# Altium footprint library huan_basic.PcbLib: 138 footprints (part 8 of 9)
Each footprint in its own frame and in the unit in brackets; x right, y up, seen from the top. Pads: shape width x height; smd on the part's side, far side on the other; paste and mask are expansions set on the pad; w line width, h text height; cw(c..) or ccw(c..) is an arc to the next point about the centre after c.
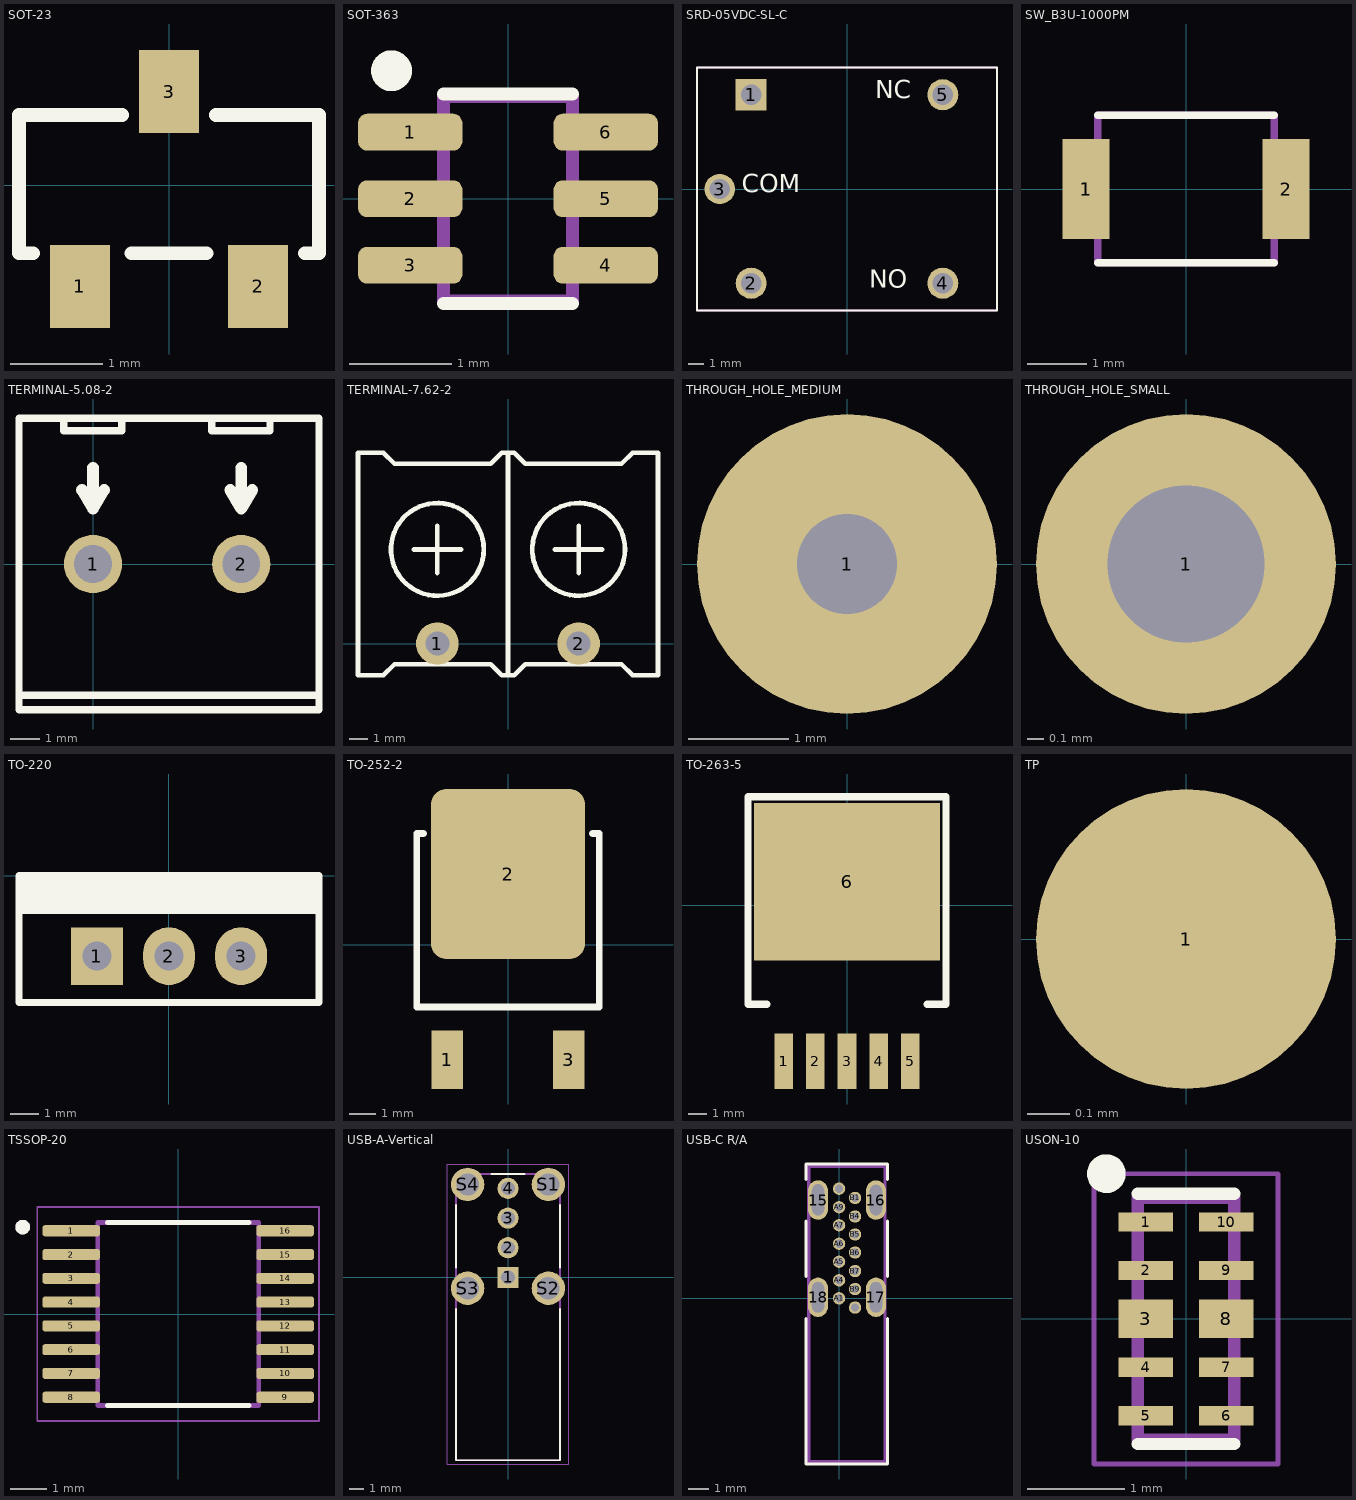
[diagram p7: the footprints below, top view; thin cyan lines are the x and y axes]

## SOT-23 [mm]
pads (3):
  rect 0.65x0.9 smd: 1(-0.965,-1.095) 2(0.965,-1.095) 3(0,1.016)
Top Overlay:
  lines w0.15: -1.473,-0.737 -1.626,-0.737 -1.626,0.762 -0.508,0.762 ; -0.406,-0.737 0.406,-0.737 ; 0.508,0.762 1.626,0.762 1.626,-0.737 1.473,-0.737
3D body "SOT23-3.step": height 1.1, standoff 0, extent -1.499,-1.25 1.499,1.25

## SOT-363 [mm]
pads (6):
  rrect50% 1.02x0.36 smd: 1(-0.955,0.65) 2(-0.955,0) 3(-0.955,-0.65) 4(0.955,-0.65) 5(0.955,0) 6(0.955,0.65)
Top Overlay:
  circle w0.2: c-1.138,1.25 r0.1
  lines w0.127: -0.63,-1.023 0.63,-1.023 ; -0.63,1.023 0.63,1.023
Mechanical 13:
  lines w0.127: -0.63,-1 -0.63,1 0.63,1 0.63,-1 -0.63,-1
3D body "step_temp.STEP": height 1.1, standoff 0, extent -1.05,-1 1.05,1

## SRD-05VDC-SL-C [mm]
pads (5):
  rect 1.98x1.98 hole 1.32: 1(-6.1,6)
  round 1.98 hole 1.32: 2(-6.1,-6) 4(6.1,-6) 5(6.1,6)
  round 1.935 hole 1.29: 3(-8.1,0)
Top Overlay:
  lines w0.127: -9.55,-7.75 9.55,-7.75 9.55,7.75 -9.55,7.75 -9.55,-7.75
  text "COM" at -6.712,-0.587 h2
  text "NO" at 1.416,-6.683 h2
  text "NC" at 1.797,5.382 h2
Mechanical 13:
  lines w0.127: -9.55,-7.75 9.55,-7.75 9.55,7.75 -9.55,7.75 -9.55,-7.75
3D body "RELAY_SRD-05VDC.STEP": height 15.9, standoff -2.8, extent -9.6,-7.8 9.6,7.8

## SW_B3U-1000PM [mm]
height 1.65
pads (3):
  rect 0.8x1.7 smd paste+0 mask+0.102: 1(-1.7,0) 1(-1.7,0) 2(1.7,0)
Top Overlay:
  lines w0.127: -1.5,-1.25 1.5,-1.25 ; -1.5,1.25 1.5,1.25
Mechanical 13:
  lines w0.127: -1.5,-1.25 -1.5,1.25 1.5,1.25 1.5,-1.25 -1.5,-1.25
3D body "step_temp.STEP": height 1.75, standoff 0, extent -2,-1.25 2,1.25

## TERMINAL-5.08-2 [mm]
pads (2):
  round 2 hole 1.3: 1(0,0) 2(5.08,0)
Top Overlay:
  lines w0.254: -2.54,-4.496 7.747,-4.496 ; -1.008,5 -1.008,4.572 0.986,4.572 0.986,5 ; 4.072,5 4.072,4.572 6.066,4.572 6.066,5 ; -2.54,-5 -2.54,5 7.747,5 7.747,-5 -2.54,-5
  lines w0.4: -0.381,2.54 0,1.905 ; 0,3.302 0,1.905 ; 0.381,2.54 0,1.905 ; 4.699,2.54 5.08,1.905 ; 5.08,3.302 5.08,1.905 ; 5.461,2.54 5.08,1.905
3D body "2er Terminal Block.step": height 14.1, standoff -4.15, extent -2.54,-5 8.02,5

## TERMINAL-7.62-2 [mm]
pads (2):
  round 2.3 hole 1.3: 1(-3.81,0) 2(3.81,0)
Top Overlay:
  circle w0.254: c3.81,5.08 r2.5
  circle w0.254: c-3.81,5.08 r2.5
  lines w0.254: -5.08,5.08 -2.54,5.08 ; -3.81,3.81 -3.81,6.35 ; 2.54,5.08 5.08,5.08 ; 3.81,3.81 3.81,6.35 ; 0,-1.714 0,10.3 ; 0,-1.714 0.343,-1.714 0.94,-1.117 6.121,-1.117 6.718,-1.714 8.09,-1.714 8.09,10.3 6.718,10.3 6.121,9.703 0.94,9.703 0.343,10.3 0,10.3 ; 0,-1.714 -0.343,-1.714 -0.94,-1.117 -6.121,-1.117 -6.718,-1.714 -8.09,-1.714 -8.09,10.3 -6.718,10.3 -6.121,9.703 -0.94,9.703 -0.343,10.3 0,10.3
3D body "Terminal Block - 7.62mm - 2 Pin.stp": height 12.22, standoff -5.08, extent -8.979,-1.714 8.09,10.3

## THROUGH_HOLE_MEDIUM [mm]
pads (1):
  round 3 hole 1: 1(0,0)

## THROUGH_HOLE_SMALL [mm]
pads (1):
  round 1.8 hole 0.94: 1(0,0)

## TO-220 [mm]
pads (3):
  rect 1.8x2 hole 1: 1(-2.5,-2.794)
  oval 1.8x2 hole 1: 2(0,-2.794) 3(2.5,-2.794)
Top Overlay:
  rectangle: -5.2,-1.336 5.2,0
  lines w0.254: -5.2,-4.4 5.2,-4.4 5.2,0 -5.2,0 -5.2,-4.4
3D body "TO-220.step": height 19, standoff -3, extent -5.2,-4.4 5.2,0

## TO-252-2 [mm]
pads (3):
  rect 1.2x2.2 smd: 1(-2.286,-4.318) 3(2.286,-4.318)
  rrect20% 5.8x6.4 smd: 2(0,2.667)
Top Overlay:
  lines w0.254: -3.175,4.191 -3.429,4.191 -3.429,-2.337 3.429,-2.337 3.429,4.191 3.175,4.191
3D body "TO-252-2.stp": height 2.35, standoff 0, extent -3.25,-4.99 3.25,4.99

## TO-263-5 [mm]
pads (8):
  rect 1x3 smd: 1(-3.4,-8.4) 1(-3.4,-8.4) 1(-3.4,-8.4) 2(-1.7,-8.4) 3(0,-8.4) 4(1.7,-8.4) 5(3.4,-8.4)
  rect 10x8.5 smd: 6(0,1.27)
Top Overlay:
  lines w0.4: -4.318,-5.334 -5.334,-5.334 -5.334,5.842 5.334,5.842 5.334,-5.334 4.318,-5.334
3D body "TO263-5-1.stp": height 4.22, standoff 0, extent -4.911,-9.561 4.911,5.041

## TP [mm]
pads (1):
  round 0.7 smd: 1(0,0)

## TSSOP-20 [mm]
height 1.2
pads (16):
  rrect50% 1.575x0.305 smd paste-0.05: 1(-2.925,2.275) 2(-2.925,1.625) 3(-2.925,0.975) 4(-2.925,0.325) 5(-2.925,-0.325) 6(-2.925,-0.975) 7(-2.925,-1.625) 8(-2.925,-2.275) 9(2.925,-2.275) 10(2.925,-1.625) 11(2.925,-0.975) 12(2.925,-0.325) 13(2.925,0.325) 14(2.925,0.975) 15(2.925,1.625) 16(2.925,2.275)
Top Overlay:
  circle w0.2: c-4.25,2.375 r0.1
  lines w0.127: -1.935,-2.5 1.935,-2.5 ; -1.935,2.5 1.935,2.5
Mechanical 13:
  circle w0.2: c-4.25,2.375 r0.1
  lines w0.127: -2.2,-2.5 2.2,-2.5 2.2,2.5 -2.2,2.5 -2.2,-2.5
Mechanical 15:
  lines w0.05: -3.85,-2.925 3.85,-2.925 3.85,2.925 -3.85,2.925 -3.85,-2.925
3D body "step_temp.STEP": height 1.1, standoff 0, extent -3.2,-2.5 3.2,2.5

## USB-A-Vertical [mm]
height 14.6
pads (8):
  rect 1.428x1.428 / inner round 1.428 / far side rect 1.428x1.428 hole 0.92: 1(0,0)
  round 1.428 hole 0.92: 2(0,2) 3(0,4) 4(0,6)
  round 2.25 hole 1.5: S1(2.72,6.27) S2(2.72,-0.73) S3(-2.72,-0.73) S4(-2.72,6.27)
Top Overlay:
  lines w0.127: -3.5,-2.13 -3.5,-12.33 3.5,-12.33 3.5,-2.13 ; -3.5,0.67 -3.5,4.87 ; -1.1,6.97 1.1,6.97 ; 3.5,0.67 3.5,4.87
Mechanical 13:
  lines w0.127: -3.5,-12.33 -3.5,6.97 3.5,6.97 3.5,-12.33 -3.5,-12.33
Mechanical 15:
  lines w0.05: -4.095,-12.58 -4.095,7.645 4.095,7.645 4.095,-12.58 -4.095,-12.58
3D body "step_temp.STEP": height 14.45, standoff -3.9, extent -3.6,-12.444 3.6,6.856

## USB-C R/A [mil]
pads (19):
  oval 38.58x76.77 hole 23.62 slot 59.06 at 90 deg: 15(-40.94,190.94) 16(71.65,190.94) 17(71.65,1.97) 18(-40.94,1.97)
  round 24 hole 16: A1(0,0) A4(0,35) A5(0,71) A6(0,106) A7(0,142) A9(0,177) A12(0,213) B1(31,195) B4(31,159) B5(31,124) B6(31,89) B7(31,53) B9(31,18) B12(31,-18)
  round 24 hole 24 unplated: ""(-41,210)
Top Overlay:
  lines w6: -64,-39 -64,-322 94,-322 94,-39 ; -64,42 -64,150 ; -64,231 -64,261 94,261 94,231 ; 94,42 94,150
Mechanical 13:
  lines w6: -59,-317 89,-317 89,256 -59,256 -59,-317
3D body "2169890001.stp": height 372.83, standoff -81.5, extent -59.02,-314.44 89.02,262.33

## USON-10 [mm]
pads (10):
  rect 0.565x0.2 smd mask+0: 1(-0.417,1) 2(-0.417,0.5) 4(-0.417,-0.5) 5(-0.417,-1) 6(0.417,-1) 7(0.417,-0.5) 9(0.417,0.5) 10(0.417,1)
  rect 0.565x0.4 smd paste-1 mask+0: 3(-0.417,0) 8(0.417,0)
Top Overlay:
  circle w0.2: c-0.823,1.5 r0.1
  lines w0.127: -0.5,-1.293 0.5,-1.293 ; -0.5,1.293 0.5,1.293
Top Paste:
  region: 0.7,-0.18 0.135,-0.18 0.135,0.18 0.7,0.18
  region: -0.135,-0.18 -0.7,-0.18 -0.7,0.18 -0.135,0.18
Top Solder:
  region: 0.77,-1.17 0.065,-1.17 0.065,-0.83 0.77,-0.83
  region: 0.77,-0.67 0.065,-0.67 0.065,-0.33 0.77,-0.33
  region: 0.77,-0.27 0.065,-0.27 0.065,0.27 0.77,0.27
  region: 0.77,0.33 0.065,0.33 0.065,0.67 0.77,0.67
  region: 0.77,0.83 0.065,0.83 0.065,1.17 0.77,1.17
  region: -0.065,-1.17 -0.77,-1.17 -0.77,-0.83 -0.065,-0.83
  region: -0.065,-0.67 -0.77,-0.67 -0.77,-0.33 -0.065,-0.33
  region: -0.065,-0.27 -0.77,-0.27 -0.77,0.27 -0.065,0.27
  region: -0.065,0.33 -0.77,0.33 -0.77,0.67 -0.065,0.67
  region: -0.065,0.83 -0.77,0.83 -0.77,1.17 -0.065,1.17
Mechanical 13:
  lines w0.127: -0.5,-1.25 0.5,-1.25 0.5,1.25 -0.5,1.25 -0.5,-1.25
Mechanical 15:
  lines w0.05: -0.95,-1.5 -0.95,1.5 0.95,1.5 0.95,-1.5 -0.95,-1.5
3D body "step_temp.STEP": height 0.55, standoff 0, extent -0.5,-1.25 0.5,1.25